# Altium footprint library DIOM5226X230N.PcbLib: 1 footprints
Each footprint in its own frame and in the unit in brackets; x right, y up, seen from the top. Pads: shape width x height; smd on the part's side, far side on the other; paste and mask are expansions set on the pad; w line width, h text height; cw(c..) or ccw(c..) is an arc to the next point about the centre after c.
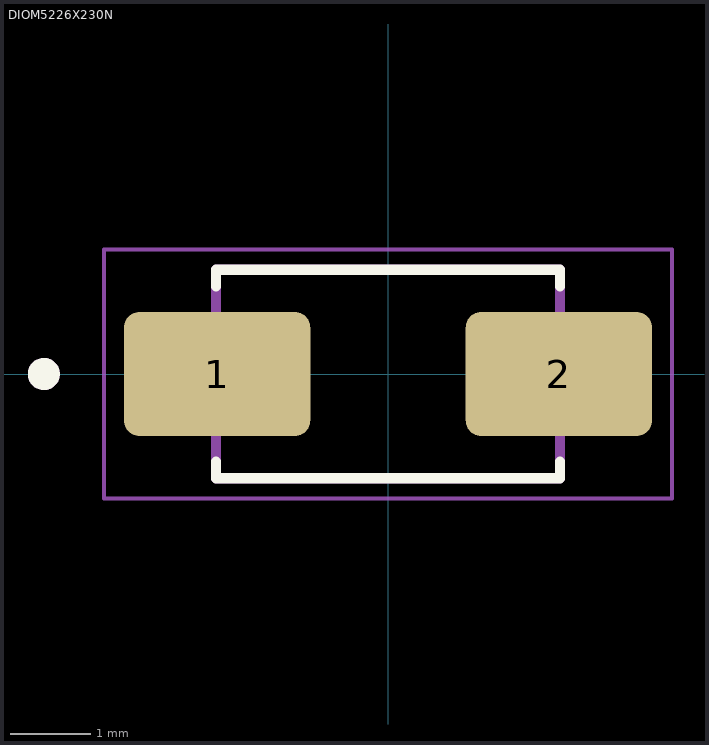
[diagram p0: the footprint, top view; thin cyan lines are the x and y axes]

## DIOM5226X230N [mm]
pads (2):
  rrect25% 2.33x1.55 smd: 1(-2.135,0) 2(2.135,0)
Top Overlay:
  circle w0.2: c-4.3,0 r0.1
  lines w0.127: -2.15,-1.095 -2.15,-1.302 2.15,-1.302 2.15,-1.095 ; -2.15,1.095 -2.15,1.302 2.15,1.302 2.15,1.095
  text ".DESIGNATOR" at -3.547,1.6 h1
Assembly Top:
  circle w0.2: c-4.3,0 r0.1
  lines w0.127: -2.15,-1.302 2.15,-1.302 2.15,1.302 -2.15,1.302 -2.15,-1.302
Courtyard Top:
  lines w0.05: -3.55,-1.552 -3.55,1.552 3.55,1.552 3.55,-1.552 -3.55,-1.552
3D body "step_temp.STEP": height 2.4, standoff 0, extent -2.598,-1.302 2.598,1.302